# Altium footprint library Semiconductors.PcbLib: 9 footprints
Each footprint in its own frame and in the unit in brackets; x right, y up, seen from the top. Pads: shape width x height; smd on the part's side, far side on the other; paste and mask are expansions set on the pad; w line width, h text height; cw(c..) or ccw(c..) is an arc to the next point about the centre after c.
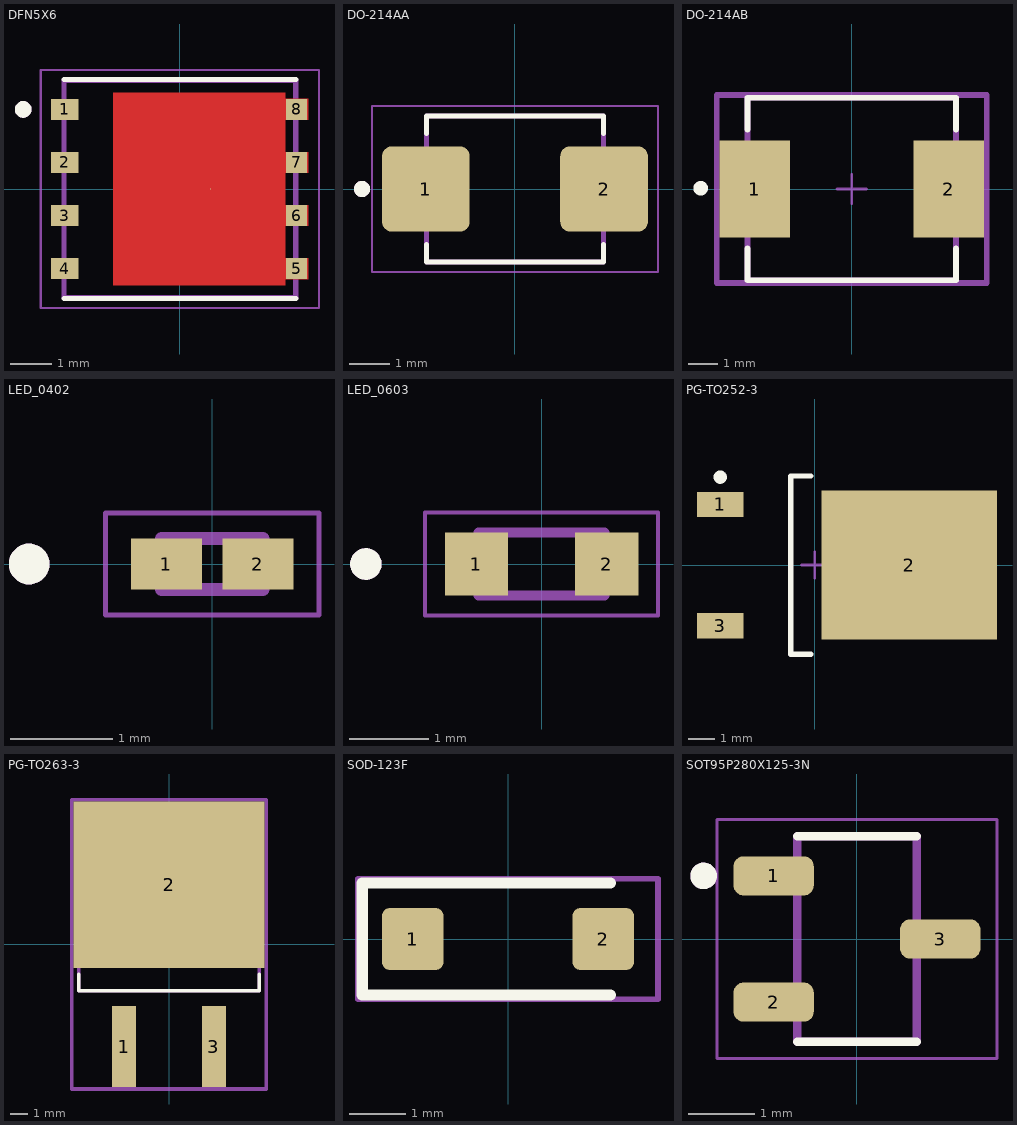
[diagram p0: the footprints below, top view; thin cyan lines are the x and y axes]

## DFN5X6 [mm] "PDFN5x6 / PDFN-8"
pads (9):
  rect 0.65x0.5 smd: 1(-2.755,1.905) 2(-2.755,0.635) 3(-2.755,-0.635) 4(-2.755,-1.905)
  round 0.025 smd: 5(0.735,0)
  rect 0.5x0.5 smd paste-1 mask+0: 5(2.794,-1.905) 6(2.794,-0.635) 7(2.794,0.635) 8(2.794,1.905)
Top Layer:
  region: 2.52,2.155 3.07,2.155 3.07,1.655 2.52,1.655 2.52,0.885 3.07,0.885 3.07,0.385 2.52,0.385 2.52,-0.385 3.07,-0.385 3.07,-0.885 2.52,-0.885 2.52,-1.655 3.07,-1.655 3.07,-2.155 2.52,-2.155 2.52,-2.3 -1.6,-2.3 -1.6,2.3 2.52,2.3
Top Overlay:
  circle w0.2: c-3.75,1.905 r0.1
  lines w0.127: -2.775,-2.62 2.775,-2.62 ; -2.775,2.62 2.775,2.62
Top Paste:
  region: 2.2,-1.98 0.78,-1.98 0.78,-0.32 2.2,-0.32
  region: 2.2,0.32 0.78,0.32 0.78,1.98 2.2,1.98
  region: 0.14,-1.98 -1.28,-1.98 -1.28,-0.32 0.14,-0.32
  region: 3.07,-2.155 2.525,-2.155 2.525,-1.655 3.07,-1.655
  region: 3.07,-0.885 2.525,-0.885 2.525,-0.385 3.07,-0.385
  region: 3.07,0.385 2.525,0.385 2.525,0.885 3.07,0.885
  region: 3.07,1.655 2.525,1.655 2.525,2.155 3.07,2.155
  region: 0.14,0.32 -1.28,0.32 -1.28,1.98 0.14,1.98
Mechanical 13:
  circle w0.2: c-3.75,1.905 r0.1
  lines w0.127: -2.775,-2.6 2.775,-2.6 2.775,2.6 -2.775,2.6 -2.775,-2.6
Mechanical 15:
  lines w0.05: -3.33,-2.85 -3.33,2.85 3.33,2.85 3.33,-2.85 -3.33,-2.85
3D body "step_temp.STEP": height 0.95, standoff -0.05, extent -3.025,-2.75 3.025,2.75

## DO-214AA [mm] "DO-214AA / SMB"
height 2.61
pads (2):
  rrect23% 2.18x2.12 smd paste+0 mask+0.102: 1(-2.215,0) 2(2.215,0)
Top Overlay:
  circle w0.2: c-3.8,0 r0.1
  lines w0.127: -2.203,-1.38 -2.203,-1.81 2.203,-1.81 2.203,-1.38 ; -2.203,1.38 -2.203,1.81 2.203,1.81 2.203,1.38
Mechanical 13:
  circle w0.2: c-3.8,0 r0.1
  lines w0.127: -2.203,-1.81 -2.203,1.81 2.203,1.81 2.203,-1.81 -2.203,-1.81
Mechanical 15:
  lines w0.05: -3.555,-2.06 3.555,-2.06 3.555,2.06 -3.555,2.06 -3.555,-2.06
3D body "step_temp.STEP": height 2.62, standoff 0.01, extent -2.7,-1.81 2.7,1.81

## DO-214AB [mm] "DO-214AB / SMC"
pads (2):
  rect 2.4x3.3 smd paste+0 mask+0: 1(-3.3,0) 2(3.3,0)
Top Overlay:
  circle w0.25: c-5.15,0.025 r0.125
  lines w0.2: -3.555,-2.025 -3.555,-3.11 3.555,-3.11 3.555,-2.025 ; -3.555,2.025 -3.555,3.11 3.555,3.11 3.555,2.025
Top 3D Body:
  lines w0.2: -3.555,-3.11 3.555,-3.11 3.555,3.11 -3.555,3.11 -3.555,-3.11
Top Courtyard:
  lines w0.2: -4.6,-3.21 4.6,-3.21 4.6,3.21 -4.6,3.21 -4.6,-3.21
Top Assembly:
  lines w0.2: -4.6,-3.21 4.6,-3.21 4.6,3.21 -4.6,3.21 -4.6,-3.21
  text ".Designator" at 0,0.188 h1
Top Component Center:
  lines w0.1: -0.5,0 0.5,0 ; 0,-0.5 0,0.5
3D body "Diode_Littelfuse_Inc_5_0SMDJ28A_eec.STEP": height 2.62, standoff 0, extent -3.97,-2.953 3.97,2.953

## LED_0402 [mm]
height 0.25
pads (2):
  rect 0.7x0.5 smd mask+0.05: 1(-0.45,0) 2(0.45,0)
Top Overlay:
  circle w0.2: c-1.8,0 r0.1
Mechanical 13:
  circle w0.2: c-1.8,0 r0.1
  lines w0.127: -0.5,-0.25 -0.5,0.25 0.5,0.25 0.5,-0.25 -0.5,-0.25
Mechanical 15:
  lines w0.05: -1.05,-0.5 1.05,-0.5 1.05,0.5 -1.05,0.5 -1.05,-0.5
3D body "step_temp.STEP": height 0.5, standoff 0, extent -0.5,-0.25 0.5,0.25

## LED_0603 [mm]
height 0.75
pads (2):
  rect 0.8x0.8 smd: 1(-0.825,0) 2(0.825,0)
Top Overlay:
  circle w0.2: c-2.225,0 r0.1
Mechanical 13:
  circle w0.2: c-2.225,0 r0.1
  lines w0.127: -0.8,-0.4 0.8,-0.4 0.8,0.4 -0.8,0.4 -0.8,-0.4
Mechanical 15:
  lines w0.05: -1.475,-0.65 -1.475,0.65 1.475,0.65 1.475,-0.65 -1.475,-0.65
3D body "step_temp.STEP": height 0.75, standoff 0, extent -0.8,-0.4 0.8,0.4

## PG-TO252-3 [mm]
pads (3):
  rect 1.75x0.95 smd paste+0 mask+0.102: 1(-3.55,2.28) 3(-3.55,-2.28)
  rect 6.6x5.6 smd paste+0 mask+0.102: 2(3.55,0)
Top Overlay:
  circle w0.25: c-3.55,3.305 r0.125
  lines w0.2: -0.15,-3.35 -0.9,-3.35 -0.9,3.35 -0.15,3.35
Mechanical 13:
  lines w0.1: -0.5,0 0.5,0 ; 0,-0.5 0,0.5
3D body "IRFR5305TRPBF.STEP": height 2.35, standoff 0, extent -3.937,-3.25 6.043,3.25

## PG-TO263-3 [mm]
pads (3):
  rect 1.35x4.6 smd paste-1000 mask+0: 1(-2.54,-5.775) 3(2.54,-5.775)
  rect 10.8x9.4 smd paste-1000 mask+0: 2(0,3.375)
Top Overlay:
  lines w0.2: -5.1,-1.7 -5.1,-2.625 5.1,-2.625 5.1,-1.7
Top Paste:
  rectangle: -3.165,-8.025 -1.915,-3.525
  rectangle: 1.915,-8.025 3.165,-3.525
  rectangle: -5.35,3.525 -0.15,8.025
  rectangle: 0.15,3.525 5.35,8.025
  rectangle: 0.15,-1.275 5.35,3.225
  rectangle: -5.35,-1.275 -0.15,3.225
Top 3D Body:
  lines w0.2: -5.1,-2.625 5.1,-2.625 5.1,6.625 -5.1,6.625 -5.1,-2.625
Top Courtyard:
  lines w0.2: -5.5,-8.175 5.5,-8.175 5.5,8.175 -5.5,8.175 -5.5,-8.175
Top Assembly:
  lines w0.2: -5.5,-8.175 5.5,-8.175 5.5,8.175 -5.5,8.175 -5.5,-8.175
  text ".Designator" at 0,-0.001 h1
Top Component Center:
  lines w0.1: -0.5,0 0.5,0 ; 0,-0.5 0,0.5
3D body "Trans_Infineon_IPB020N10N5LFATMA1_eec.STEP": height 0.25, standoff 0, extent -5.5,-8.175 5.5,8.175

## SOD-123F [mm]
pads (2):
  rrect25% 1.1x1.1 smd: 1(-1.7,0) 2(1.7,0)
Top Overlay:
  lines w0.2: 1.825,-1 -2.6,-1 -2.6,1 1.825,1
Mechanical 15:
  lines w0.1: -2.675,-1.075 2.675,-1.075 2.675,1.075 -2.675,1.075 -2.675,-1.075
3D body "p35_SOD-123F.stp": height 1, standoff 0, extent -1.9,-0.8 1.9,0.8

## SOT95P280X125-3N [mm] "SOT-23 / SOT-23-3"
height 1.25
pads (3):
  rrect50% 1.21x0.59 smd: 1(-1.255,0.95) 2(-1.255,-0.95) 3(1.255,0)
Top Overlay:
  circle w0.2: c-2.31,0.95 r0.1
  lines w0.127: -0.9,-1.55 0.9,-1.55 ; -0.9,1.55 0.9,1.55
Mechanical 13:
  circle w0.2: c-2.31,0.95 r0.1
  lines w0.127: -0.9,-1.55 0.9,-1.55 0.9,1.55 -0.9,1.55 -0.9,-1.55
Mechanical 15:
  lines w0.05: -2.11,-1.8 2.11,-1.8 2.11,1.8 -2.11,1.8 -2.11,-1.8
3D body "step_temp.STEP": height 1.25, standoff 0, extent -1.4,-1.45 1.4,1.45